# Altium footprint library HARWIN_P70-2200045.PcbLib: 1 footprints
Each footprint in its own frame and in the unit in brackets; x right, y up, seen from the top. Pads: shape width x height; smd on the part's side, far side on the other; paste and mask are expansions set on the pad; w line width, h text height; cw(c..) or ccw(c..) is an arc to the next point about the centre after c.
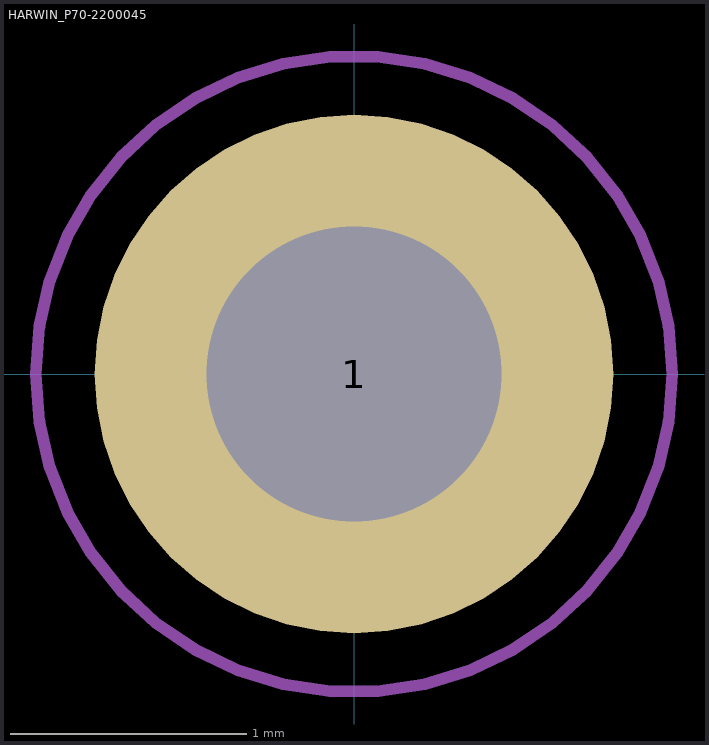
[diagram p0: the footprint, top view; thin cyan lines are the x and y axes]

## HARWIN_P70-2200045 [mm]
height 8.35
pads (1):
  round 2.2 hole 1.25: 1(0,0)
Mechanical 13:
  circle w0.127: c0,0 r1
Mechanical 15:
  circle w0.05: c0,0 r1.35
3D body "p70-2200045.stp": height 8.2, standoff -2.1, extent -1,-0.993 1,0.993